# Altium footprint library Switch$.PcbLib: 117 footprints (part 2 of 8)
Each footprint in its own frame and in the unit in brackets; x right, y up, seen from the top. Pads: shape width x height; smd on the part's side, far side on the other; paste and mask are expansions set on the pad; w line width, h text height; cw(c..) or ccw(c..) is an arc to the next point about the centre after c.
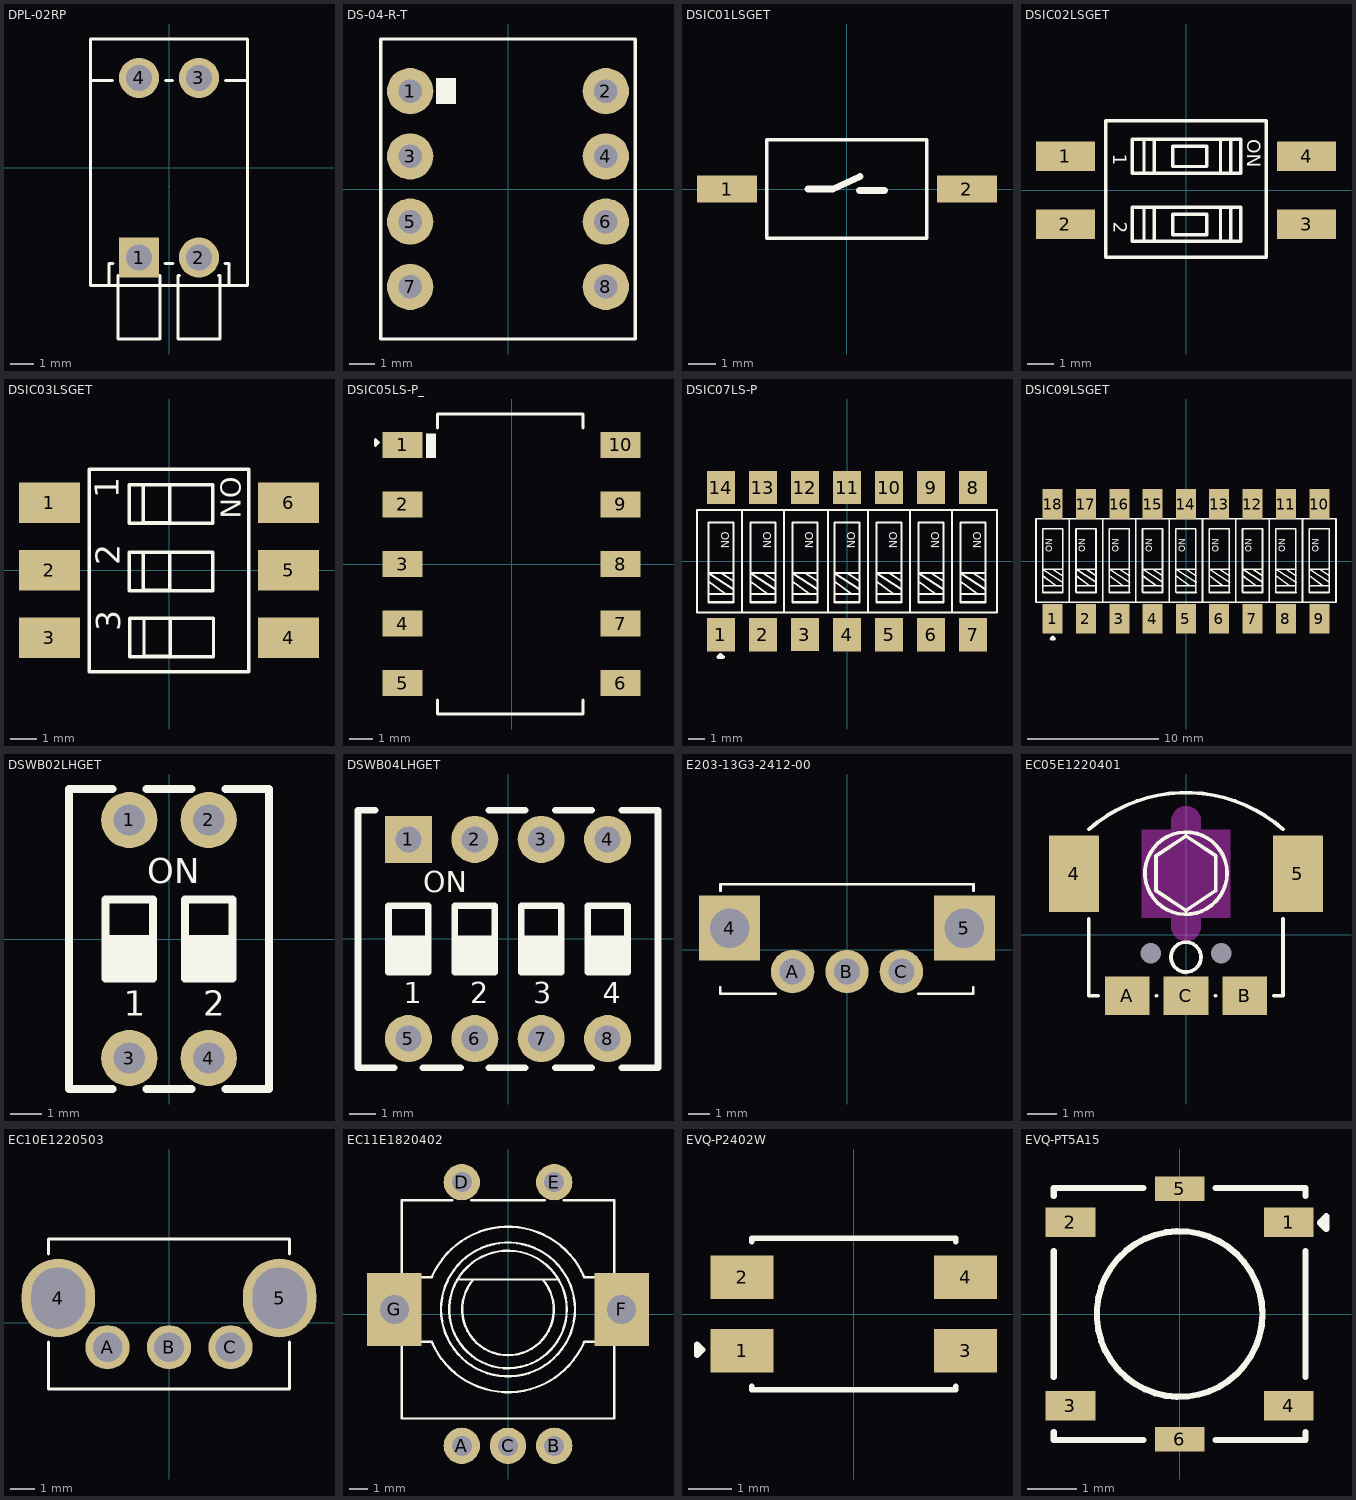
[diagram p1: the footprints below, top view; thin cyan lines are the x and y axes]

## DPL-02RP [mm]
pads (4):
  rect 1.7x1.7 hole 1.1 paste-2539.97 mask+0.051: 1(-1.27,-3.81)
  round 1.7 hole 1.1 paste-2539.97 mask+0.051: 2(1.27,-3.81) 3(1.27,3.81) 4(-1.27,3.81)
Top Overlay:
  lines w0.127: -3.32,3.692 -2.395,3.692 ; -2.54,-5 -2.54,-4.064 -2.372,-4.064 ; -2.105,-4.572 -2.159,-4.572 -2.159,-7.264 -0.381,-7.264 -0.381,-4.572 -0.435,-4.572 ; -0.168,-4.064 0.168,-4.064 ; -0.145,3.692 0.145,3.692 ; 0.435,-4.572 0.381,-4.572 0.381,-7.264 2.159,-7.264 2.159,-4.572 2.105,-4.572 ; 2.372,-4.064 2.54,-4.064 2.54,-5 ; 2.395,3.692 3.32,3.692 ; -3.32,-5 3.32,-5 3.32,5.461 -3.32,5.461 -3.32,-5
Top Courtyard:
  lines w0.003: -0.018,-1.683 -0.018,-1.682 ; 0,-0.794 0,-0.793
3D body "C319071.step": height 9.4, standoff -4, extent -3.32,-7.215 3.32,5.416

## DS-04-R-T [mm]
pads (8):
  round 1.8 hole 0.92: 1(-3.81,3.81) 2(3.81,3.81) 3(-3.81,1.27) 4(3.81,1.27) 5(-3.81,-1.27) 6(3.81,-1.27) 7(-3.81,-3.81) 8(3.81,-3.81)
Top Overlay:
  rectangle: -2.794,3.302 -2.032,4.318
  lines w0.127: -4.95,-5.84 4.95,-5.84 4.95,5.84 -4.95,5.84 -4.95,-5.84
3D body "kangshen DS-04-R-T.STEP": height 6.7, standoff -3.8, extent -4.95,-5.84 4.95,5.84

## DSIC01LSGET [mm]
pads (2):
  rect 2.2x1 smd mask+0.055: 1(-4.4,0) 2(4.4,0)
Top Overlay:
  lines w0.127: -2.946,-1.803 -2.946,1.803 2.921,1.803 2.921,-1.803 -2.946,-1.803
  lines w0.254: -1.422,0 -0.508,0 0.483,0.457 ; 0.457,-0.051 1.372,-0.051
3D body "SMD DIP SWITCH 1P.step": height 4.36, standoff 0.04, extent -4.9,-1.74 4.9,1.74

## DSIC02LSGET [mm]
pads (4):
  rect 2.2x1.1 smd paste+0 mask+0.05: 1(-4.5,1.27) 2(-4.5,-1.27) 3(4.5,-1.27) 4(4.5,1.27)
Top Overlay:
  lines w0.127: -1.569,-1.905 -1.569,-0.635 ; -1.569,0.635 -1.569,1.905 ; -1.188,-1.905 -1.188,-0.635 ; -1.188,0.635 -1.188,1.905 ; 1.288,-1.905 1.288,-0.635 ; 1.288,0.635 1.288,1.905 ; 1.669,-1.905 1.669,-0.635 ; 1.669,0.635 1.669,1.905 ; -3,-2.5 -3,2.6 3,2.6 3,-2.5 -3,-2.5 ; -2.014,-1.905 -2.014,-0.635 2.05,-0.635 2.05,-1.905 -2.014,-1.905 ; -2.014,0.635 -2.014,1.905 2.05,1.905 2.05,0.635 -2.014,0.635 ; -0.49,-1.651 -0.49,-0.889 0.78,-0.889 0.78,-1.651 -0.49,-1.651 ; -0.49,0.889 -0.49,1.651 0.78,1.651 0.78,0.889 -0.49,0.889
  text "2" at -2.698,-1.17 h0.5
  text "1" at -2.716,1.37 h0.5
  text "ON" at 2.283,1.9 h0.5
3D body "C54949.step": height 4.35, standoff 0, extent -4.65,-2.54 4.65,2.54

## DSIC03LSGET [mil]
pads (6):
  rect 90x60 smd paste+0 mask+2: 1(-177.16,100) 2(-177.16,0) 3(-177.16,-100) 4(177.16,-100) 5(177.16,0) 6(177.16,100)
Top Overlay:
  lines w5: -118.11,-150 -118.11,150 118.11,150 118.11,-150 -118.11,-150 ; -59,-30 -59,27 65,27 65,-30 -59,-30 ; -59,70 -59,127 65,127 65,70 -59,70 ; -58,-128 -58,-71 66,-71 66,-128 -58,-128 ; -38,-29 -38,27 1,27 1,-29 -38,-29 ; -38,71 -38,127 1,127 1,71 -38,71 ; -37,-127 -37,-71 2,-71 2,-127 -37,-127
  text "3" at -72.28,-90 h35.43
  text "2" at -73.28,8 h35.43
  text "1" at -74.28,107 h35.43
  text "ON" at 77,139 h30
3D body "C57453.step": height 163.39, standoff 0, extent -183.07,-150 183.07,150

## DSIC05LS-P_ [mm]
pads (10):
  rect 1.7x1.1 smd: 1(-4.65,5.08) 2(-4.65,2.54) 3(-4.65,0) 4(-4.65,-2.54) 5(-4.65,-5.08) 6(4.65,-5.08) 7(4.65,-2.54) 8(4.65,0) 9(4.65,2.54) 10(4.65,5.08)
Top Overlay:
  rectangle: -3.658,4.521 -3.226,5.563
  lines w0.127: -3.15,-5.8 -3.15,-6.4 3.05,-6.4 3.05,-5.8 ; -3.15,5.8 -3.15,6.4 3.05,6.4 3.05,5.8 ; -5.801,5.059 -5.674,5.186 -5.801,5.313 -5.801,5.059
3D body "DSIC05LS-P.STEP": height 4.15, standoff 0, extent -4.88,-6.326 4.88,6.374

## DSIC07LS-P [mm]
pads (14):
  rect 1.7x2 smd paste+0 mask+0.051: 1(-7.62,-4.45) 2(-5.08,-4.45) 3(-2.54,-4.445) 4(0,-4.45) 5(2.54,-4.45) 6(5.08,-4.45) 7(7.62,-4.45) 8(7.62,4.45) 9(5.08,4.445) 10(2.54,4.45) 11(0,4.45) 12(-2.54,4.45) 13(-5.08,4.45) 14(-7.62,4.45)
Top Overlay:
  lines w0.127: -9.07,3.1 -9.07,-3.1 9.07,-3.1 9.07,3.1 ; -9.068,3.1 9.068,3.1 ; -8.382,-1.975 -6.858,-1.975 ; -8.382,-1.213 -7.366,-1.975 ; -7.62,-0.705 -6.858,-1.213 ; -6.858,-1.721 -8.382,-0.705 -6.858,-0.705 ; -6.35,-3.1 -6.35,3.1 ; -5.842,-1.975 -4.318,-1.975 ; -5.842,-1.213 -4.826,-1.975 ; -5.08,-0.705 -4.318,-1.213 ; -4.318,-1.721 -5.842,-0.705 -4.318,-0.705 ; -3.81,-3.1 -3.81,3.1 ; -3.302,-1.975 -1.778,-1.975 ; -3.302,-1.213 -2.286,-1.975 ; -2.54,-0.705 -1.778,-1.213 ; -1.778,-1.721 -3.302,-0.705 -1.778,-0.705 ; -1.143,-3.1 -1.143,3.1 ; -0.762,-1.975 0.762,-1.975 ; -0.762,-1.213 0.254,-1.975 ; 0,-0.705 0.762,-1.213 ; 0.762,-1.721 -0.762,-0.705 0.762,-0.705 ; 1.27,-3.1 1.27,3.1 ; 1.778,-1.975 3.302,-1.975 ; 1.778,-1.213 2.794,-1.975 ; 2.54,-0.705 3.302,-1.213 ; 3.302,-1.721 1.778,-0.705 3.302,-0.705 ; 3.81,-3.1 3.81,3.1 ; 4.318,-1.975 5.842,-1.975 ; 4.318,-1.213 5.334,-1.975 ; 5.08,-0.705 5.842,-1.213 ; 5.842,-1.721 4.318,-0.705 5.842,-0.705 ; 6.35,-3.1 6.35,3.1 ; 6.858,-1.975 8.382,-1.975 ; 6.858,-1.213 7.874,-1.975 ; 7.62,-0.705 8.382,-1.213 ; 8.382,-1.721 6.858,-0.705 8.382,-0.705 ; -8.382,-2.483 -8.382,2.343 -6.858,2.343 -6.858,-2.483 -8.382,-2.483 ; -5.842,-2.483 -4.318,-2.483 -4.318,2.343 -5.842,2.343 -5.842,-2.483 ; -3.302,-2.483 -3.302,2.343 -1.778,2.343 -1.778,-2.483 -3.302,-2.483 ; -0.762,-2.483 0.762,-2.483 0.762,2.343 -0.762,2.343 -0.762,-2.483 ; 1.778,-2.483 1.778,2.343 3.302,2.343 3.302,-2.483 1.778,-2.483 ; 4.318,-2.483 5.842,-2.483 5.842,2.343 4.318,2.343 4.318,-2.483 ; 6.858,-2.483 6.858,2.343 8.382,2.343 8.382,-2.483 6.858,-2.483
  lines w0.254: -7.772,-5.791 -7.518,-5.791 -7.645,-5.664 -7.772,-5.791
  text "ON" at -7.608,1.779 h0.49
  text "ON" at -2.528,1.779 h0.49
  text "ON" at 0.012,1.779 h0.49
  text "ON" at 2.552,1.779 h0.49
  text "ON" at 5.092,1.779 h0.49
  text "ON" at 7.632,1.779 h0.49
  text "ON" at -5.068,1.779 h0.49
3D body "C319033.step": height 4.15, standoff 0, extent -8.89,-4.88 8.89,4.88

## DSIC09LSGET [mil]
pads (18):
  rect 60x90 smd: 1(-400.4,-172.25) 2(-300.4,-172.25) 3(-200.4,-172.25) 4(-100.4,-172.25) 5(-0.4,-172.25) 6(99.6,-172.25) 7(199.6,-172.25) 8(299.6,-172.25) 9(400.4,-172.25) 10(400.4,172.25) 11(299.6,172.25) 12(199.6,172.25) 13(99.6,172.25) 14(-0.4,172.25) 15(-100.4,172.25) 16(-200.4,172.25) 17(-300.4,172.25) 18(-400.4,172.25)
Top Overlay:
  lines w5: -430.4,-93.34 -370.4,-93.34 ; -430.4,-92.24 -430.4,97.76 -370.4,97.76 -370.4,-92.24 ; -430.4,-73.34 -370.4,-73.34 ; -430.4,-43.34 -390.4,-73.34 ; -400.4,-23.34 -370.4,-43.34 ; -370.4,-63.34 -430.4,-23.34 -370.4,-23.34 ; -330.4,-92.24 -330.4,97.76 -270.4,97.76 -270.4,-92.24 ; -329.61,-93.34 -269.61,-93.34 ; -329.61,-73.34 -269.61,-73.34 ; -329.61,-43.34 -289.61,-73.34 ; -299.61,-23.34 -269.61,-43.34 ; -269.61,-63.34 -329.61,-23.34 -269.61,-23.34 ; -230.4,-92.24 -230.4,97.76 -170.4,97.76 -170.4,-92.24 ; -229.61,-93.34 -169.61,-93.34 ; -229.61,-73.34 -169.61,-73.34 ; -229.61,-43.34 -189.61,-73.34 ; -199.61,-23.34 -169.61,-43.34 ; -169.61,-63.34 -229.61,-23.34 -169.61,-23.34 ; -130.4,-92.24 -130.4,97.76 -70.4,97.76 -70.4,-92.24 ; -129.61,-93.34 -69.61,-93.34 ; -129.61,-73.34 -69.61,-73.34 ; -129.61,-43.34 -89.61,-73.34 ; -99.61,-23.34 -69.61,-43.34 ; -69.61,-63.34 -129.61,-23.34 -69.61,-23.34 ; -30.4,-92.24 -30.4,97.76 29.6,97.76 29.6,-92.24 ; -29.61,-93.34 30.39,-93.34 ; -29.61,-73.34 30.39,-73.34 ; -29.61,-43.34 10.39,-73.34 ; 0.39,-23.34 30.39,-43.34 ; 30.39,-63.34 -29.61,-23.34 30.39,-23.34 ; 69.6,-92.24 69.6,97.76 129.6,97.76 129.6,-92.24 ; 70.39,-93.34 130.39,-93.34 ; 70.39,-73.34 130.39,-73.34 ; 70.39,-43.34 110.39,-73.34 ; 100.39,-23.34 130.39,-43.34 ; 130.39,-63.34 70.39,-23.34 130.39,-23.34 ; 169.6,-92.24 169.6,97.76 229.6,97.76 229.6,-92.24 ; 170.39,-93.34 230.39,-93.34 ; 170.39,-73.34 230.39,-73.34 ; 170.39,-43.34 210.39,-73.34 ; 200.39,-23.34 230.39,-43.34 ; 230.39,-63.34 170.39,-23.34 230.39,-23.34 ; 269.6,-92.24 269.6,97.76 329.6,97.76 329.6,-92.24 ; 270.39,-93.34 330.39,-93.34 ; 270.39,-73.34 330.39,-73.34 ; 270.39,-43.34 310.39,-73.34 ; 300.39,-23.34 330.39,-43.34 ; 330.39,-63.34 270.39,-23.34 330.39,-23.34 ; 370.39,-93.34 430.39,-93.34 ; 370.39,-92.24 370.39,97.76 430.39,97.76 430.39,-92.24 ; 370.39,-73.34 430.39,-73.34 ; 370.39,-43.34 410.39,-73.34 ; 400.39,-23.34 430.39,-43.34 ; 430.39,-63.34 370.39,-23.34 430.39,-23.34 ; -350.4,-122.24 -350.4,127.76 ; -350.4,-122.24 -250.4,-122.24 ; -350.4,-122.24 -350.4,127.76 ; -350.4,-122.24 -450.4,-122.24 -450.4,127.76 -350.4,127.76 ; -350.4,127.76 -250.4,127.76 ; -250.4,-122.24 -250.4,127.76 ; -250.4,-122.24 -250.4,127.76 ; -250.4,-122.24 -250.4,127.76 ; -250.4,-122.24 -150.4,-122.24 ; -250.4,127.76 -150.4,127.76 ; -150.4,-122.24 -150.4,127.76 ; -150.4,-122.24 -50.4,-122.24 ; -150.4,127.76 -50.4,127.76 ; -50.4,-122.24 -50.4,127.76 ; -50.4,-122.24 -50.4,127.76 ; -50.4,-122.24 49.6,-122.24 ; -50.4,127.76 49.6,127.76 ; 49.6,-122.24 49.6,127.76 ; 49.6,-122.24 49.6,127.76 ; 49.6,-122.24 149.6,-122.24 ; 49.6,-122.24 49.6,127.76 ; 49.6,127.76 149.6,127.76 ; 149.6,-122.24 149.6,127.76 ; 149.6,-122.24 149.6,127.76 ; 149.6,-122.24 249.6,-122.24 ; 149.6,-122.24 149.6,127.76 ; 149.6,-122.24 149.6,127.76 ; 149.6,127.76 249.6,127.76 ; 249.6,-122.24 249.6,127.76 ; 249.6,-122.24 349.6,-122.24 349.6,127.76 249.6,127.76 ; 249.6,-122.24 249.6,127.76 ; 249.6,-122.24 249.6,127.76 ; 249.6,-122.24 249.6,127.76 ; 249.6,-122.24 249.6,127.76 ; 350.39,-122.24 350.39,127.76 ; 350.39,-122.24 450.39,-122.24 ; 350.39,-122.24 350.39,127.76 ; 350.39,-122.24 350.39,127.76 ; 350.39,-122.24 350.39,127.76 ; 350.39,127.76 450.39,127.76 ; 450.39,-122.24 450.39,127.76 ; 450.39,-122.24 450.39,127.76 ; 450.39,-122.24 450.39,127.76 ; 450.39,-122.24 450.39,127.76 ; 450.39,-122.24 450.39,127.76
  lines w10: -405,-233 -400,-228 -395,-233 -405,-233
  text "ON" at 398.97,26.75 h19.47
  text "ON" at 298.17,26.75 h19.47
  text "ON" at 98.17,26.75 h19.47
  text "ON" at -401.83,26.75 h19.47
  text "ON" at -301.83,26.75 h19.47
  text "ON" at -201.83,26.75 h19.47
  text "ON" at -101.83,26.75 h19.47
  text "ON" at -1.83,26.75 h19.47
  text "ON" at 198.17,26.75 h19.47
3D body "C57455.step": height 163.39, standoff 0, extent -449.61,-181.77 450.39,184.37

## DSWB02LHGET [mm]
pads (4):
  round 1.8 hole 1 paste-2539.97 mask+0.051: 1(-1.27,3.81) 2(1.27,3.81) 3(-1.27,-3.81) 4(1.27,-3.81)
Top Overlay:
  lines w0.254: -2.032,-1.016 -0.508,-1.016 ; -2.032,-0.762 -0.508,-0.762 ; -2.032,-0.508 -0.508,-0.508 ; -2.032,-0.254 -0.508,-0.254 ; -2.032,0 -0.508,0 ; -1.814,-4.8 -3.2,-4.8 -3.2,4.8 -1.814,4.8 ; -0.726,-4.8 0.726,-4.8 ; -0.726,4.8 0.726,4.8 ; 0.508,-1.016 2.032,-1.016 ; 0.508,-0.762 2.032,-0.762 ; 0.508,-0.508 2.032,-0.508 ; 0.508,-0.254 2.032,-0.254 ; 0.508,0 2.032,0 ; 1.814,-4.8 3.2,-4.8 3.2,4.8 1.814,4.8 ; -2.032,-1.27 -2.032,1.27 -0.508,1.27 -0.508,-1.27 -2.032,-1.27 ; 0.508,-1.27 0.508,1.27 2.032,1.27 2.032,-1.27 0.508,-1.27
  text "2" at 1.092,-2.464 h0.8
  text "1" at -1.448,-2.464 h0.8
  text "ON" at -0.7,1.787 h0.8
3D body "DIP Red 2-way.step": height 6.7, standoff -2, extent -3.22,-4.95 3.22,4.95

## DSWB04LHGET [mm]
pads (8):
  rect 1.8x1.8 hole 1 paste-2539.97 mask+0.051: 1(-3.81,3.81)
  round 1.8 hole 1 paste-2539.97 mask+0.051: 2(-1.27,3.81) 3(1.27,3.81) 4(3.81,3.81) 5(-3.81,-3.81) 6(-1.27,-3.81) 7(1.27,-3.81) 8(3.81,-3.81)
Top Overlay:
  lines w0.254: -5.08,4.927 -5.74,4.927 -5.74,-4.927 -4.354,-4.927 ; -4.572,-1.016 -3.048,-1.016 ; -4.572,-0.762 -3.048,-0.762 ; -4.572,-0.508 -3.048,-0.508 ; -4.572,-0.254 -3.048,-0.254 ; -4.572,0 -3.048,0 ; -3.266,-4.927 -1.814,-4.927 ; -2.032,-1.016 -0.508,-1.016 ; -2.032,-0.762 -0.508,-0.762 ; -2.032,-0.508 -0.508,-0.508 ; -2.032,-0.254 -0.508,-0.254 ; -2.032,0 -0.508,0 ; -0.726,-4.927 0.66,-4.927 ; -0.726,4.927 0.66,4.927 ; 0.508,-1.016 2.032,-1.016 ; 0.508,-0.762 2.032,-0.762 ; 0.508,-0.508 2.032,-0.508 ; 0.508,-0.254 2.032,-0.254 ; 0.508,0 2.032,0 ; 1.814,-4.927 3.2,-4.927 ; 1.814,4.927 3.2,4.927 ; 3.048,-1.016 4.572,-1.016 ; 3.048,-0.762 4.572,-0.762 ; 3.048,-0.508 4.572,-0.508 ; 3.048,-0.254 4.572,-0.254 ; 3.048,0 4.572,0 ; 4.354,-4.927 5.74,-4.927 5.74,4.927 4.354,4.927 ; -4.572,-1.27 -4.572,1.27 -3.048,1.27 -3.048,-1.27 -4.572,-1.27 ; -2.032,-1.27 -2.032,1.27 -0.508,1.27 -0.508,-1.27 -2.032,-1.27 ; 0.508,-1.27 0.508,1.27 2.032,1.27 2.032,-1.27 0.508,-1.27 ; 3.048,-1.27 3.048,1.27 4.572,1.27 4.572,-1.27 3.048,-1.27
  text "4" at 3.632,-2.464 h0.8
  text "3" at 0.965,-2.464 h0.8
  text "2" at -1.448,-2.464 h0.8
  text "1" at -3.988,-2.464 h0.8
  text "ON" at -3.24,1.787 h0.8
3D body "DIP Red 4-way.step": height 6.7, standoff -2, extent -5.76,-4.95 5.76,4.95

## E203-13G3-2412-00 [mm]
pads (5):
  rect 2.8x3 hole 1.82 square paste-2539.97 mask+0.051: 4(-5.4,1) 5(5.4,1)
  round 2 hole 1.2 paste-2539.97 mask+0.051: A(-2.5,-1) B(0,-1) C(2.5,-1)
Top Overlay:
  lines w0.127: -5.827,-1.718 -5.827,-2.023 -3.293,-2.023 ; -5.817,2.718 -5.817,3.023 5.817,3.023 5.817,2.718 ; 3.272,-2.023 5.806,-2.023 5.806,-1.718
3D body "Encoder.STEP": height 16.94, standoff -3.05, extent -5.787,-2.028 5.787,2.972

## EC05E1220401 [mm]
pads (7):
  rect 1.7x2.6 smd paste+0 mask+0.051: 4(-3.8,2.075) 5(3.8,2.075)
  rect 1.524x1.3 smd paste+0 mask+0.051: A(-2,-2.075) B(2,-2.075) C(0,-2.075)
  round 0 hole 0.7 unplated paste-2539.97: ""(-1.2,-0.625) ""(1.2,-0.625)
Top Overlay:
  circle w0.127: c0,-0.762 r0.508
  circle w0.127: c0,2.091 r1.397
  lines w0.127: -3.302,0.544 -3.302,-2.075 -2.993,-2.075 ; -3.302,3.583 cw(c0,-0.145) 3.302,3.583 ; -1.007,-2.075 -0.993,-2.075 ; 0.993,-2.075 1.007,-2.075 ; 2.993,-2.075 3.302,-2.075 3.302,0.544 ; -1.016,1.498 -1.016,2.683 0,3.361 1.016,2.682 1.016,1.499 0,0.821 -1.016,1.498
Keep-Out Layer:
  board cut-out: -1.5,3.575 -0.5,3.575 -0.5,3.873 -0.501,3.874 -0.501,3.973 -0.425,4.155 -0.285,4.295 -0.102,4.371 -0.003,4.371 0.004,4.371 0.102,4.371 0.285,4.295 0.424,4.156 0.5,3.974 0.5,3.875 0.5,3.575 1.5,3.575 1.5,0.575 0.5,0.575 0.5,0.275 0.5,0.176 0.424,-0.006 0.285,-0.146 0.102,-0.222 0.003,-0.222 -0.003,-0.222 -0.102,-0.222 -0.285,-0.146 -0.424,-0.006 -0.5,0.176 -0.5,0.275 -0.5,0.575 -1.5,0.575
3D body "C116648.step": height 2.71, standoff -0.5, extent -3.802,-2.237 3.802,4.563

## EC10E1220503 [mm]
pads (5):
  oval 3x3.2 hole 2.2 slot 2.5 at 90 deg paste-2539.97 mask+0.051: 4(-4.5,1) 5(4.5,1)
  round 1.8 hole 1.2 paste-2539.97 mask+0.051: A(-2.5,-1) B(0,-1) C(2.5,-1)
Top Overlay:
  lines w0.127: -4.9,-0.784 -4.9,-2.7 4.9,-2.7 4.9,-0.784 ; -4.9,2.784 -4.9,3.4 4.9,3.4 4.9,2.784
3D body "EC10E1220503.step1.STEP": height 15.49, standoff -3.58, extent -5.523,-2.7 5.524,3.4

## EC11E1820402 [mm]
pads (7):
  round 2 hole 1.1 paste-2539.97 mask+0.051: A(-2.54,-7.25) B(2.54,-7.25) C(0,-7.25) D(-2.54,7.25) E(2.54,7.25)
  rect 3x4 hole 1.6 square paste-2539.97 mask+0.051: F(6.25,0.25) G(-6.25,0.25)
Top Overlay:
  circle w0.127: c0,0.25 r3.683
  circle w0.127: c0,0.25 r3.234
  lines w0.127: -5.85,-1.78 -5.85,-5.75 5.85,-5.75 5.85,-1.78 ; -5.85,2.28 -5.85,6.25 -3.066,6.25 ; -5.321,-1.528 -4.191,-1.528 ccw(c0,0.25) 4.171,-1.575 ; -5.321,2.028 -4.191,2.028 ; -4.171,2.075 cw(c0,0.25) 4.191,2.028 5.321,2.028 ; -2.794,1.901 2.794,1.901 ; -2.014,6.25 2.014,6.25 ; -1.905,1.901 ccw(c0,0.25) 1.905,1.901 ; 3.066,6.25 5.85,6.25 5.85,2.28 ; 4.191,-1.528 5.321,-1.528
3D body "C361167.step": height 24.5, standoff -3.5, extent -6.289,-7.35 6.289,7.35

## EVQ-P2402W [mm]
pads (4):
  rect 1.45x1 smd: 1(-2.575,-0.85) 2(-2.575,0.85) 3(2.575,-0.85) 4(2.575,0.85)
Top Overlay:
  lines w0.127: -2.35,-1.663 -2.35,-1.75 2.35,-1.75 2.35,-1.663 ; -2.35,1.663 -2.35,1.75 2.35,1.75 2.35,1.663 ; -3.616,-0.952 -3.616,-0.698 -3.489,-0.825 -3.616,-0.952
3D body "EVQ-P2402W.step": height 2.5, standoff 0, extent -2.75,-1.75 2.75,1.75

## EVQ-PT5A15 [mm]
pads (6):
  rect 1x0.6 smd paste+0 mask+0.051: 1(2.2,1.85) 2(-2.2,1.85) 3(-2.2,-1.85) 4(2.2,-1.85)
  rect 1x0.5 smd paste+0 mask+0.051: 5(0,2.525) 6(0,-2.525)
Top Overlay:
  circle w0.127: c0,0 r1.671
  lines w0.127: -2.54,-2.381 -2.54,-2.54 -0.731,-2.54 ; -2.54,-1.27 -2.54,1.27 ; -2.54,2.381 -2.54,2.54 -0.731,2.54 ; 0.731,-2.54 2.54,-2.54 2.54,-2.381 ; 0.731,2.54 2.54,2.54 2.54,2.381 ; 2.54,-1.27 2.54,1.27 ; 2.832,1.841 2.959,1.714 2.959,1.968 2.832,1.841
3D body "C2915179.step": height 1.51, standoff 0, extent -2.502,-2.4 2.502,2.4